# Altium integrated library DS3231STR.IntLib: 1 symbol
Pins are listed as number, name and electrical type; pins without a type are passive.

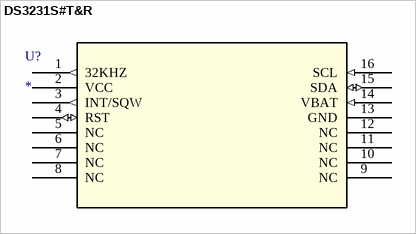
[diagram p0: symbol DS3231S#T&R]

## DS3231S#T&R
designator U?
Imported; Manufacturer_Part_Number: DS3231S#T&R; Vendor: Maxim Integrated Products; Built_By: EMA_UL_Team; C: Copyright (C) 2015 Accelerated Designs. All rights reserved; RefDes: RefDes; Type: DEV; Value: Value
footprint 21-0042B_16
pins: 1 32KHZ (out), 2 VCC (power), 3 INT/SQW (out), 4 RST (io), 5 NC, 6 NC, 7 NC, 8 NC, 9 NC, 10 NC, 11 NC, 12 NC, 13 GND (power), 14 VBAT (in), 15 SDA (io), 16 SCL (in)